# Altium footprint library NSC Amplifier.PcbLib: 106 footprints (part 5 of 7)
Each footprint in its own frame and in the unit in brackets; x right, y up, seen from the top. Pads: shape width x height; smd on the part's side, far side on the other; paste and mask are expansions set on the pad; w line width, h text height; cw(c..) or ccw(c..) is an arc to the next point about the centre after c.
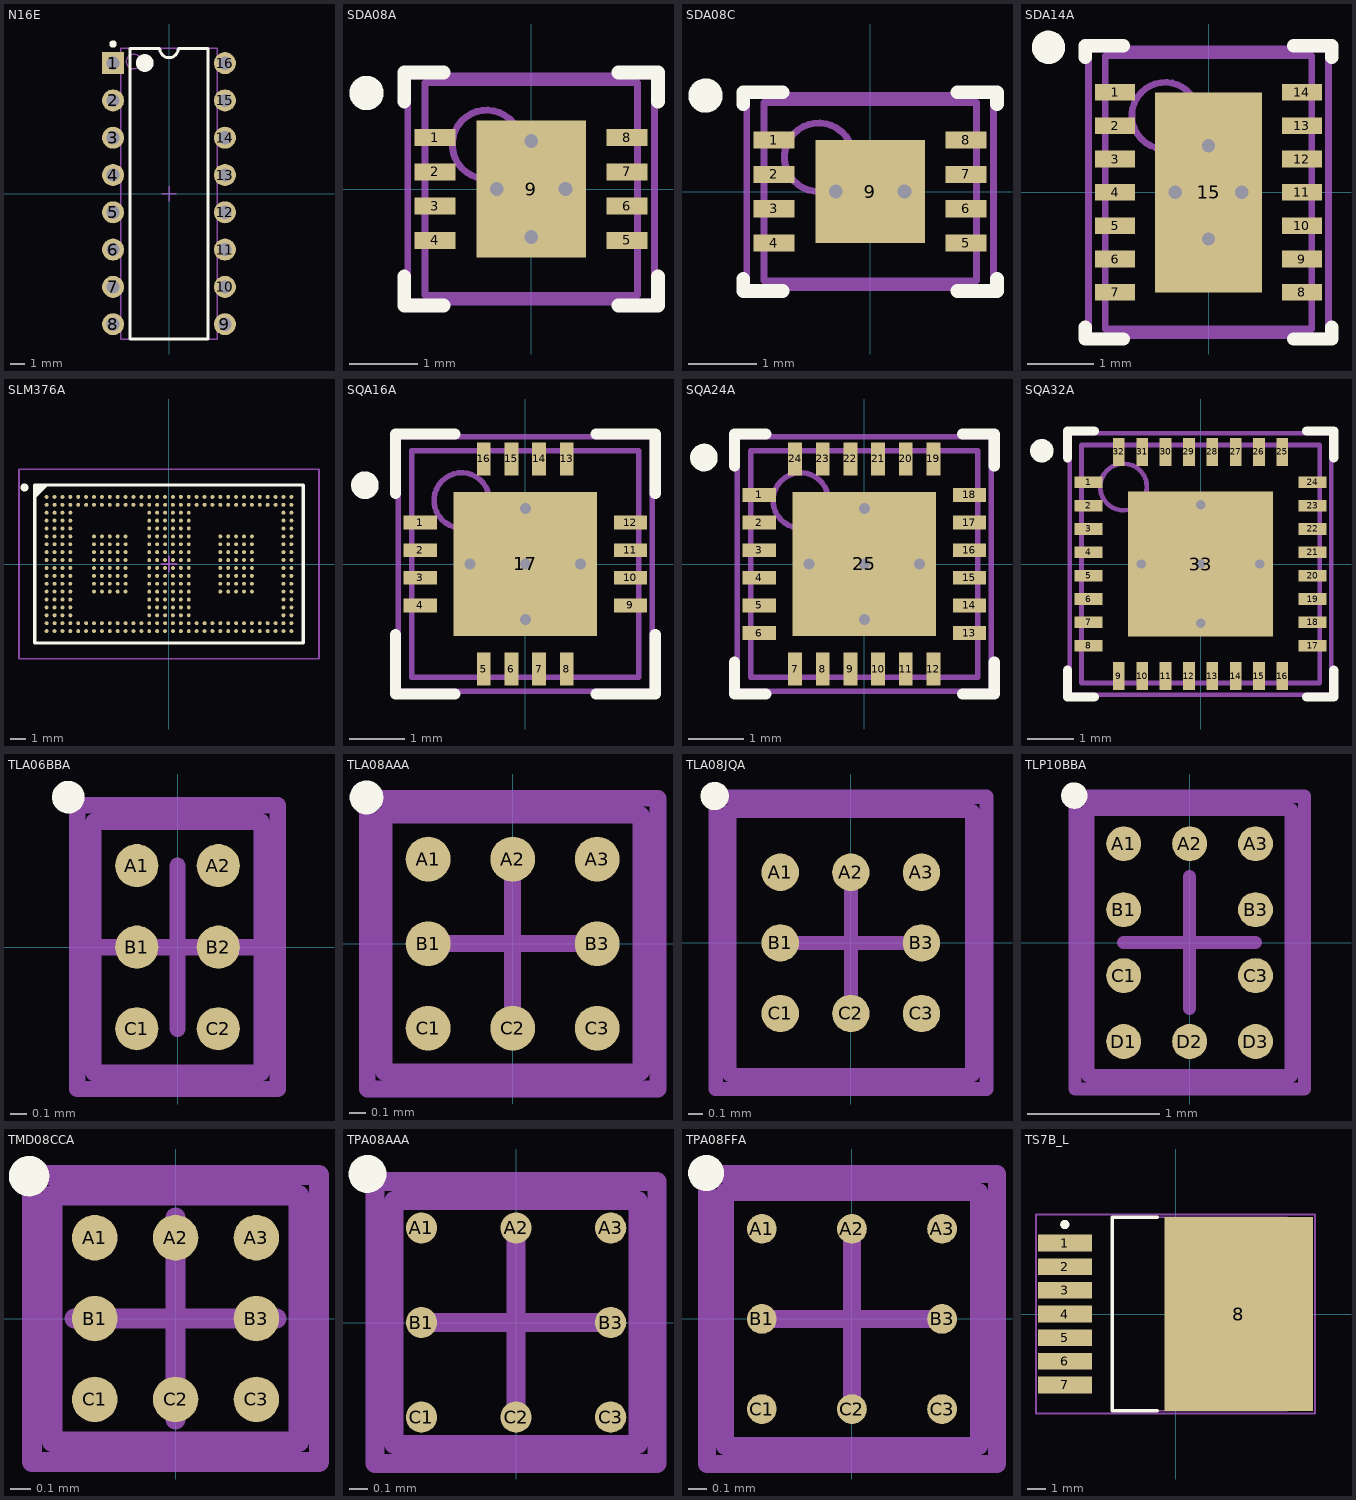
[diagram p4: the footprints below, top view; thin cyan lines are the x and y axes]

## N16E [mm] "DIP, 16-Leads, Row Spacing 7.62mm, Pitch 2.54mm, Body 19.3x6.35mm"
height 4.32
pads (16):
  rect 1.5x1.5 hole 0.9: 1(-3.81,8.89)
  round 1.5 hole 0.9: 2(-3.81,6.35) 3(-3.81,3.81) 4(-3.81,1.27) 5(-3.81,-1.27) 6(-3.81,-3.81) 7(-3.81,-6.35) 8(-3.81,-8.89) 9(3.81,-8.89) 10(3.81,-6.35) 11(3.81,-3.81) 12(3.81,-1.27) 13(3.81,1.27) 14(3.81,3.81) 15(3.81,6.35) 16(3.81,8.89)
Top Overlay:
  circle w0.25: c-3.81,10.19 r0.125
  circle w0.6: c-1.65,8.9 r0.3
  lines w0.2: -2.65,-9.9 -2.65,9.9 -0.635,9.9 ccw(c0,9.9) 0.635,9.9 2.65,9.9 2.65,-9.9 -2.65,-9.9
Mechanical 13:
  circle w0.1: c-2.4,9 r0.5
  lines w0.1: -3.3,-9.9 -3.3,9.9 3.3,9.9 3.3,-9.9 -3.3,-9.9
Mechanical 15:
  lines w0.1: -0.5,0 0.5,0 ; 0,-0.5 0,0.5
3D body: height 4.32, standoff 0, extent -3.3,-9.9 3.3,9.9

## SDA08A [mm] "SON, 8-Leads, Body 3x3mm, Pitch 0.5mm, NSC Recommended"
height 0.8
pads (9):
  rect 0.6x0.25 smd paste-0.125 mask+0.051: 1(-1.4,0.75) 2(-1.4,0.25) 3(-1.4,-0.25) 4(-1.4,-0.75) 5(1.4,-0.75) 6(1.4,-0.25) 7(1.4,0.25) 8(1.4,0.75)
  rect 1.6x2 smd paste-0.05 mask+0.051: 9(0,0)
via -0.5,0 diameter 0.5 hole 0.2
via 0.5,0 diameter 0.5 hole 0.2
via 0,0.7 diameter 0.5 hole 0.2
via 0,-0.7 diameter 0.5 hole 0.2
Top Overlay:
  circle w0.25: c-2.4,1.4 r0.125
  lines w0.2: -1.85,-1.275 -1.85,-1.7 -1.275,-1.7 ; -1.85,1.275 -1.85,1.7 -1.275,1.7 ; 1.275,-1.7 1.85,-1.7 1.85,-1.275 ; 1.275,1.7 1.85,1.7 1.85,1.275
Top Paste:
  region: 1.2,0.875 1.2,0.625 1.9,0.625 1.9,0.875
  region: 1.2,0.375 1.2,0.125 1.9,0.125 1.9,0.375
  region: 1.2,-0.125 1.2,-0.375 1.9,-0.375 1.9,-0.125
  region: 1.2,-0.625 1.2,-0.875 1.9,-0.875 1.9,-0.625
  region: -1.9,-0.625 -1.9,-0.875 -1.2,-0.875 -1.2,-0.625
  region: -1.9,-0.125 -1.9,-0.375 -1.2,-0.375 -1.2,-0.125
  region: -1.9,0.375 -1.9,0.125 -1.2,0.125 -1.2,0.375
  region: -1.9,0.875 -1.9,0.625 -1.2,0.625 -1.2,0.875
Mechanical 13:
  circle w0.1: c-0.65,0.65 r0.5
  lines w0.1: -1.55,-1.55 1.55,-1.55 1.55,1.55 -1.55,1.55 -1.55,-1.55
Mechanical 15:
  lines w0.1: -0.5,0 0.5,0 ; 0,-0.5 0,0.5 ; -1.8,-1.65 1.8,-1.65 1.8,1.65 -1.8,1.65 -1.8,-1.65
3D body: height 0.8, standoff 0, extent -1.55,-1.55 1.55,1.55

## SDA08C [mm] "SON, 8-Leads, Body 2.5x3mm, Pitch 0.5mm, NSC Recommended"
height 0.8
pads (9):
  rect 0.6x0.25 smd paste-0.125 mask+0.051: 1(-1.4,0.75) 2(-1.4,0.25) 3(-1.4,-0.25) 4(-1.4,-0.75) 5(1.4,-0.75) 6(1.4,-0.25) 7(1.4,0.25) 8(1.4,0.75)
  rect 1.6x1.5 smd paste-0.05 mask+0.051: 9(0,0)
via 0.5,0 diameter 0.5 hole 0.2
via -0.5,0 diameter 0.5 hole 0.2
Top Overlay:
  circle w0.25: c-2.4,1.4 r0.125
  lines w0.2: -1.85,-1.275 -1.85,-1.45 -1.275,-1.45 ; -1.85,1.275 -1.85,1.45 -1.275,1.45 ; 1.275,-1.45 1.85,-1.45 1.85,-1.275 ; 1.275,1.45 1.85,1.45 1.85,1.275
Top Paste:
  region: -1.9,0.875 -1.9,0.625 -1.2,0.625 -1.2,0.875
  region: -1.9,0.375 -1.9,0.125 -1.2,0.125 -1.2,0.375
  region: -1.9,-0.125 -1.9,-0.375 -1.2,-0.375 -1.2,-0.125
  region: -1.9,-0.625 -1.9,-0.875 -1.2,-0.875 -1.2,-0.625
  region: 1.2,-0.625 1.2,-0.875 1.9,-0.875 1.9,-0.625
  region: 1.2,-0.125 1.2,-0.375 1.9,-0.375 1.9,-0.125
  region: 1.2,0.375 1.2,0.125 1.9,0.125 1.9,0.375
  region: 1.2,0.875 1.2,0.625 1.9,0.625 1.9,0.875
Mechanical 13:
  circle w0.1: c-0.75,0.5 r0.5
  lines w0.1: -1.55,-1.3 -1.55,1.3 1.55,1.3 1.55,-1.3 -1.55,-1.3
Mechanical 15:
  lines w0.1: -0.5,0 0.5,0 ; 0,-0.5 0,0.5 ; -1.8,-1.4 1.8,-1.4 1.8,1.4 -1.8,1.4 -1.8,-1.4
3D body: height 0.8, standoff 0, extent -1.549,-1.299 1.549,1.299

## SDA14A [mm] "SON, 14-Leads, Body 4x3mm, Pitch 0.5mm, NSC Recommended"
height 0.8
pads (15):
  rect 0.6x0.25 smd paste-0.125 mask+0.051: 1(-1.4,1.5) 2(-1.4,1) 3(-1.4,0.5) 4(-1.4,0) 5(-1.4,-0.5) 6(-1.4,-1) 7(-1.4,-1.5) 8(1.4,-1.5) 9(1.4,-1) 10(1.4,-0.5) 11(1.4,0) 12(1.4,0.5) 13(1.4,1) 14(1.4,1.5)
  rect 1.6x3 smd paste-0.8 mask+0.051: 15(0,0)
via -0.5,0 diameter 0.5 hole 0.2
via 0.5,0 diameter 0.5 hole 0.2
via 0,0.7 diameter 0.5 hole 0.2
via 0,-0.7 diameter 0.5 hole 0.2
Top Overlay:
  circle w0.25: c-2.4,2.175 r0.125
  lines w0.2: -1.85,-2.025 -1.85,-2.2 -1.275,-2.2 ; -1.85,2.025 -1.85,2.2 -1.275,2.2 ; 1.275,-2.2 1.85,-2.2 1.85,-2.025 ; 1.275,2.2 1.85,2.2 1.85,2.025
Top Paste:
  region: -0.7,-0.1 -0.7,-1.4 -0.1,-1.4 -0.1,-0.1
  region: -0.1,0.1 -0.1,1.4 -0.7,1.4 -0.7,0.1
  region: 0.7,0.1 0.7,1.4 0.1,1.4 0.1,0.1
  region: 0.1,-0.1 0.1,-1.4 0.7,-1.4 0.7,-0.1
  region: 1.2,1.625 1.2,1.375 1.9,1.375 1.9,1.625
  region: 1.2,1.125 1.2,0.875 1.9,0.875 1.9,1.125
  region: 1.2,0.625 1.2,0.375 1.9,0.375 1.9,0.625
  region: 1.2,0.125 1.2,-0.125 1.9,-0.125 1.9,0.125
  region: 1.2,-0.375 1.2,-0.625 1.9,-0.625 1.9,-0.375
  region: 1.2,-0.875 1.2,-1.125 1.9,-1.125 1.9,-0.875
  region: 1.2,-1.375 1.2,-1.625 1.9,-1.625 1.9,-1.375
  region: -1.9,-1.375 -1.9,-1.625 -1.2,-1.625 -1.2,-1.375
  region: -1.9,-0.875 -1.9,-1.125 -1.2,-1.125 -1.2,-0.875
  region: -1.9,-0.375 -1.9,-0.625 -1.2,-0.625 -1.2,-0.375
  region: -1.9,0.125 -1.9,-0.125 -1.2,-0.125 -1.2,0.125
  region: -1.9,0.625 -1.9,0.375 -1.2,0.375 -1.2,0.625
  region: -1.9,1.125 -1.9,0.875 -1.2,0.875 -1.2,1.125
  region: -1.9,1.625 -1.9,1.375 -1.2,1.375 -1.2,1.625
Mechanical 13:
  circle w0.1: c-0.65,1.15 r0.5
  lines w0.1: -1.55,-2.05 1.55,-2.05 1.55,2.05 -1.55,2.05 -1.55,-2.05
Mechanical 15:
  lines w0.1: -0.5,0 0.5,0 ; 0,-0.5 0,0.5 ; -1.8,-2.15 1.8,-2.15 1.8,2.15 -1.8,2.15 -1.8,-2.15
3D body: height 0.8, standoff 0, extent -1.55,-2.05 1.55,2.05

## SLM376A [mm] "BGA, 376-Leads, Body 10x17mm, Pitch 0.5mm"
height 1.2
pads (376):
  round 0.25 smd: A1(-7.75,4.25) A2(-7.25,4.25) A3(-6.75,4.25) A4(-6.25,4.25) A5(-5.75,4.25) A6(-5.25,4.25) A7(-4.75,4.25) A8(-4.25,4.25) A9(-3.75,4.25) A10(-3.25,4.25) A11(-2.75,4.25) A12(-2.25,4.25) A13(-1.75,4.25) A14(-1.25,4.25) A15(-0.75,4.25) A16(-0.25,4.25) A17(0.25,4.25) A18(0.75,4.25) A19(1.25,4.25) A20(1.75,4.25) A21(2.25,4.25) A22(2.75,4.25) A23(3.25,4.25) A24(3.75,4.25) A25(4.25,4.25) A26(4.75,4.25) A27(5.25,4.25) A28(5.75,4.25) A29(6.25,4.25) A30(6.75,4.25) A31(7.25,4.25) A32(7.75,4.25) B1(-7.75,3.75) B2(-7.25,3.75) B3(-6.75,3.75) B4(-6.25,3.75) B5(-5.75,3.75) B6(-5.25,3.75) B7(-4.75,3.75) B8(-4.25,3.75) B9(-3.75,3.75) B10(-3.25,3.75) B11(-2.75,3.75) B12(-2.25,3.75) B13(-1.75,3.75) B14(-1.25,3.75) B15(-0.75,3.75) B16(-0.25,3.75) B17(0.25,3.75) B18(0.75,3.75) B19(1.25,3.75) B20(1.75,3.75) B21(2.25,3.75) B22(2.75,3.75) B23(3.25,3.75) B24(3.75,3.75) B25(4.25,3.75) B26(4.75,3.75) B27(5.25,3.75) B28(5.75,3.75) B29(6.25,3.75) B30(6.75,3.75) B31(7.25,3.75) B32(7.75,3.75) C1(-7.75,3.25) C2(-7.25,3.25) C3(-6.75,3.25) C4(-6.25,3.25) C14(-1.25,3.25) C15(-0.75,3.25) C16(-0.25,3.25) C17(0.25,3.25) C18(0.75,3.25) C19(1.25,3.25) C31(7.25,3.25) C32(7.75,3.25) D1(-7.75,2.75) D2(-7.25,2.75) D3(-6.75,2.75) D4(-6.25,2.75) D14(-1.25,2.75) D15(-0.75,2.75) D16(-0.25,2.75) D17(0.25,2.75) D18(0.75,2.75) D19(1.25,2.75) D31(7.25,2.75) D32(7.75,2.75) E1(-7.75,2.25) E2(-7.25,2.25) E3(-6.75,2.25) E4(-6.25,2.25) E14(-1.25,2.25) E15(-0.75,2.25) E16(-0.25,2.25) E17(0.25,2.25) E18(0.75,2.25) E19(1.25,2.25) E31(7.25,2.25) E32(7.75,2.25) F1(-7.75,1.75) F2(-7.25,1.75) F3(-6.75,1.75) F4(-6.25,1.75) F7(-4.75,1.75) F8(-4.25,1.75) F9(-3.75,1.75) F10(-3.25,1.75) F11(-2.75,1.75) F14(-1.25,1.75) F15(-0.75,1.75) F16(-0.25,1.75) F17(0.25,1.75) F18(0.75,1.75) F19(1.25,1.75) F23(3.25,1.75) F24(3.75,1.75) F25(4.25,1.75) F26(4.75,1.75) F27(5.25,1.75) F31(7.25,1.75) F32(7.75,1.75) G1(-7.75,1.25) G2(-7.25,1.25) G3(-6.75,1.25) G4(-6.25,1.25) G7(-4.75,1.25) G8(-4.25,1.25) G9(-3.75,1.25) G10(-3.25,1.25) G11(-2.75,1.25) G14(-1.25,1.25) G15(-0.75,1.25) G16(-0.25,1.25) G17(0.25,1.25) G18(0.75,1.25) G19(1.25,1.25) G23(3.25,1.25) G24(3.75,1.25) G25(4.25,1.25) G26(4.75,1.25) G27(5.25,1.25) G31(7.25,1.25) G32(7.75,1.25) H1(-7.75,0.75) H2(-7.25,0.75) H3(-6.75,0.75) H4(-6.25,0.75) H7(-4.75,0.75) H8(-4.25,0.75) H9(-3.75,0.75) H10(-3.25,0.75) H11(-2.75,0.75) H14(-1.25,0.75) H15(-0.75,0.75) H16(-0.25,0.75) H17(0.25,0.75) H18(0.75,0.75) H19(1.25,0.75) H23(3.25,0.75) H24(3.75,0.75) H25(4.25,0.75) H26(4.75,0.75) H27(5.25,0.75) H31(7.25,0.75) H32(7.75,0.75) J1(-7.75,0.25) J2(-7.25,0.25) J3(-6.75,0.25) J4(-6.25,0.25) J7(-4.75,0.25) J8(-4.25,0.25) J9(-3.75,0.25) J10(-3.25,0.25) J11(-2.75,0.25) J14(-1.25,0.25) J15(-0.75,0.25) J16(-0.25,0.25) J17(0.25,0.25) J18(0.75,0.25) J19(1.25,0.25) J23(3.25,0.25) J24(3.75,0.25) J25(4.25,0.25) J26(4.75,0.25) J27(5.25,0.25) J31(7.25,0.25) J32(7.75,0.25) K1(-7.75,-0.25) K2(-7.25,-0.25) K3(-6.75,-0.25) K4(-6.25,-0.25) K7(-4.75,-0.25) K8(-4.25,-0.25) K9(-3.75,-0.25) K10(-3.25,-0.25) K11(-2.75,-0.25) K14(-1.25,-0.25) K15(-0.75,-0.25) K16(-0.25,-0.25) K17(0.25,-0.25) K18(0.75,-0.25) K19(1.25,-0.25) K23(3.25,-0.25) K24(3.75,-0.25) K25(4.25,-0.25) K26(4.75,-0.25) K27(5.25,-0.25) K31(7.25,-0.25) K32(7.75,-0.25) L1(-7.75,-0.75) L2(-7.25,-0.75) L3(-6.75,-0.75) L4(-6.25,-0.75) L7(-4.75,-0.75) L8(-4.25,-0.75) L9(-3.75,-0.75) L10(-3.25,-0.75) L11(-2.75,-0.75) L14(-1.25,-0.75) L15(-0.75,-0.75) L16(-0.25,-0.75) L17(0.25,-0.75) L18(0.75,-0.75) L19(1.25,-0.75) L23(3.25,-0.75) L24(3.75,-0.75) L25(4.25,-0.75) L26(4.75,-0.75) L27(5.25,-0.75) L31(7.25,-0.75) L32(7.75,-0.75) M1(-7.75,-1.25) M2(-7.25,-1.25) M3(-6.75,-1.25) M4(-6.25,-1.25) M7(-4.75,-1.25) M8(-4.25,-1.25) M9(-3.75,-1.25) M10(-3.25,-1.25) M11(-2.75,-1.25) M14(-1.25,-1.25) M15(-0.75,-1.25) M16(-0.25,-1.25) M17(0.25,-1.25) M18(0.75,-1.25) M19(1.25,-1.25) M23(3.25,-1.25) M24(3.75,-1.25) M25(4.25,-1.25) M26(4.75,-1.25) M27(5.25,-1.25) M31(7.25,-1.25) M32(7.75,-1.25) N1(-7.75,-1.75) N2(-7.25,-1.75) N3(-6.75,-1.75) N4(-6.25,-1.75) N7(-4.75,-1.75) N8(-4.25,-1.75) N9(-3.75,-1.75) N10(-3.25,-1.75) N11(-2.75,-1.75) N14(-1.25,-1.75) N15(-0.75,-1.75) N16(-0.25,-1.75) N17(0.25,-1.75) N18(0.75,-1.75) N19(1.25,-1.75) N23(3.25,-1.75) N24(3.75,-1.75) N25(4.25,-1.75) N26(4.75,-1.75) N27(5.25,-1.75) N31(7.25,-1.75) N32(7.75,-1.75) P1(-7.75,-2.25) P2(-7.25,-2.25) P3(-6.75,-2.25) P4(-6.25,-2.25) P14(-1.25,-2.25) P15(-0.75,-2.25) P16(-0.25,-2.25) P17(0.25,-2.25) P18(0.75,-2.25) P19(1.25,-2.25) P31(7.25,-2.25) P32(7.75,-2.25) R1(-7.75,-2.75) R2(-7.25,-2.75) R3(-6.75,-2.75) R4(-6.25,-2.75) R14(-1.25,-2.75) R15(-0.75,-2.75) R16(-0.25,-2.75) R17(0.25,-2.75) R18(0.75,-2.75) R19(1.25,-2.75) R31(7.25,-2.75) R32(7.75,-2.75) T1(-7.75,-3.25) T2(-7.25,-3.25) T3(-6.75,-3.25) T4(-6.25,-3.25) T14(-1.25,-3.25) T15(-0.75,-3.25) T16(-0.25,-3.25) T17(0.25,-3.25) T18(0.75,-3.25) T19(1.25,-3.25) T31(7.25,-3.25) T32(7.75,-3.25) U1(-7.75,-3.75) U2(-7.25,-3.75) U3(-6.75,-3.75) U4(-6.25,-3.75) U5(-5.75,-3.75) U6(-5.25,-3.75) U7(-4.75,-3.75) U8(-4.25,-3.75) U9(-3.75,-3.75) U10(-3.25,-3.75) U11(-2.75,-3.75) U12(-2.25,-3.75) U13(-1.75,-3.75) U14(-1.25,-3.75) U15(-0.75,-3.75) U16(-0.25,-3.75) U17(0.25,-3.75) U18(0.75,-3.75) U19(1.25,-3.75) U20(1.75,-3.75) U21(2.25,-3.75) U22(2.75,-3.75) U23(3.25,-3.75) U24(3.75,-3.75) U25(4.25,-3.75) U26(4.75,-3.75) U27(5.25,-3.75) U28(5.75,-3.75) U29(6.25,-3.75) U30(6.75,-3.75) U31(7.25,-3.75) U32(7.75,-3.75) V1(-7.75,-4.25) V2(-7.25,-4.25) V3(-6.75,-4.25) V4(-6.25,-4.25) V5(-5.75,-4.25) V6(-5.25,-4.25) V7(-4.75,-4.25) V8(-4.25,-4.25) V9(-3.75,-4.25) V10(-3.25,-4.25) V11(-2.75,-4.25) V12(-2.25,-4.25) V13(-1.75,-4.25) V14(-1.25,-4.25) V15(-0.75,-4.25) V16(-0.25,-4.25) V17(0.25,-4.25) V18(0.75,-4.25) V19(1.25,-4.25) V20(1.75,-4.25) V21(2.25,-4.25) V22(2.75,-4.25) V23(3.25,-4.25) V24(3.75,-4.25) V25(4.25,-4.25) V26(4.75,-4.25) V27(5.25,-4.25) V28(5.75,-4.25) V29(6.25,-4.25) V30(6.75,-4.25) V31(7.25,-4.25) V32(7.75,-4.25)
Top Overlay:
  circle w0.25: c-9.15,4.85 r0.125
  region: -7.742,5 -8.5,4.242 -8.5,5
  lines w0.2: -8.5,4.242 -7.742,5 ; -8.5,-5 8.5,-5 8.5,5 -8.5,5 -8.5,-5
Mechanical 13:
  lines w0.1: -8.5,-5 8.5,-5 8.5,5 -8.5,5 -8.5,-5
Mechanical 15:
  lines w0.1: -0.5,0 0.5,0 ; 0,-0.5 0,0.5 ; -9.5,-6 9.5,-6 9.5,6 -9.5,6 -9.5,-6
3D body: height 1.2, standoff 0.16, extent -8.5,-5 8.5,5

## SQA16A [mm] "QFN, 16-Leads, Body 4x4mm, Pitch 0.5mm, NSC Recommended"
height 0.8
pads (17):
  rect 0.6x0.25 smd paste-0.125 mask+0.051: 1(-1.9,0.75) 2(-1.9,0.25) 3(-1.9,-0.25) 4(-1.9,-0.75) 9(1.9,-0.75) 10(1.9,-0.25) 11(1.9,0.25) 12(1.9,0.75)
  rect 0.25x0.6 smd paste-0.125 mask+0.051: 5(-0.75,-1.9) 6(-0.25,-1.9) 7(0.25,-1.9) 8(0.75,-1.9) 13(0.75,1.9) 14(0.25,1.9) 15(-0.25,1.9) 16(-0.75,1.9)
  rect 2.6x2.6 smd paste-1.3 mask+0.051: 17(0,0)
via 0,-1 diameter 0.5 hole 0.2
via 0,1 diameter 0.5 hole 0.2
via -1,0 diameter 0.5 hole 0.2
via 1,0 diameter 0.5 hole 0.2
via 0,0 diameter 0.5 hole 0.2
Top Overlay:
  circle w0.25: c-2.9,1.425 r0.125
  lines w0.2: -2.35,-1.275 -2.35,-2.35 -1.275,-2.35 ; -2.35,1.275 -2.35,2.35 -1.275,2.35 ; 1.275,-2.35 2.35,-2.35 2.35,-1.275 ; 1.275,2.35 2.35,2.35 2.35,1.275
Top Paste:
  rectangle: 0.1,-1.2 1.2,-0.1
  region: -0.1,-0.1 -1.2,-0.1 -1.2,-1.2 -0.1,-1.2
  region: -0.1,1.2 -1.2,1.2 -1.2,0.1 -0.1,0.1
  rectangle: 0.1,0.1 1.2,1.2
  rectangle: -2.4,0.625 -1.7,0.875
  rectangle: -2.4,0.125 -1.7,0.375
  rectangle: -2.4,-0.375 -1.7,-0.125
  rectangle: -2.4,-0.875 -1.7,-0.625
  region: 2.4,0.875 1.7,0.875 1.7,0.625 2.4,0.625
  region: 2.4,0.375 1.7,0.375 1.7,0.125 2.4,0.125
  region: 2.4,-0.125 1.7,-0.125 1.7,-0.375 2.4,-0.375
  region: 2.4,-0.625 1.7,-0.625 1.7,-0.875 2.4,-0.875
  region: -0.875,2.4 -0.875,1.7 -0.625,1.7 -0.625,2.4
  region: -0.375,2.4 -0.375,1.7 -0.125,1.7 -0.125,2.4
  region: 0.125,2.4 0.125,1.7 0.375,1.7 0.375,2.4
  region: 0.625,2.4 0.625,1.7 0.875,1.7 0.875,2.4
  region: 0.875,-2.4 0.875,-1.7 0.625,-1.7 0.625,-2.4
  region: 0.375,-2.4 0.375,-1.7 0.125,-1.7 0.125,-2.4
  region: -0.125,-2.4 -0.125,-1.7 -0.375,-1.7 -0.375,-2.4
  region: -0.625,-2.4 -0.625,-1.7 -0.875,-1.7 -0.875,-2.4
Mechanical 13:
  circle w0.1: c-1.15,1.15 r0.5
  lines w0.1: -2.05,-2.05 -2.05,2.05 2.05,2.05 2.05,-2.05 -2.05,-2.05
Mechanical 15:
  lines w0.1: -0.5,0 0.5,0 ; 0,-0.5 0,0.5 ; -2.3,-2.3 -2.3,2.3 2.3,2.3 2.3,-2.3 -2.3,-2.3
3D body: height 0.8, standoff 0, extent -2.05,-2.05 2.05,2.05

## SQA24A [mm] "QFN, 24-Leads, Body 4x4mm, Pitch 0.5mm, NSC Recommended"
height 0.8
pads (25):
  rect 0.6x0.25 smd paste-0.125 mask+0.051: 1(-1.9,1.25) 2(-1.9,0.75) 3(-1.9,0.25) 4(-1.9,-0.25) 5(-1.9,-0.75) 6(-1.9,-1.25) 13(1.9,-1.25) 14(1.9,-0.75) 15(1.9,-0.25) 16(1.9,0.25) 17(1.9,0.75) 18(1.9,1.25)
  rect 0.25x0.6 smd paste-0.125 mask+0.051: 7(-1.25,-1.9) 8(-0.75,-1.9) 9(-0.25,-1.9) 10(0.25,-1.9) 11(0.75,-1.9) 12(1.25,-1.9) 19(1.25,1.9) 20(0.75,1.9) 21(0.25,1.9) 22(-0.25,1.9) 23(-0.75,1.9) 24(-1.25,1.9)
  rect 2.6x2.6 smd paste-1.3 mask+0.051: 25(0,0)
via 0,-1 diameter 0.5 hole 0.2
via 0,1 diameter 0.5 hole 0.2
via -1,0 diameter 0.5 hole 0.2
via 1,0 diameter 0.5 hole 0.2
via 0,0 diameter 0.5 hole 0.2
Top Overlay:
  circle w0.25: c-2.9,1.925 r0.125
  lines w0.2: -2.35,-1.775 -2.35,-2.35 -1.775,-2.35 ; -2.35,1.775 -2.35,2.35 -1.775,2.35 ; 1.775,-2.35 2.35,-2.35 2.35,-1.775 ; 1.775,2.35 2.35,2.35 2.35,1.775
Top Paste:
  rectangle: 0.1,0.1 1.2,1.2
  region: -0.1,1.2 -1.2,1.2 -1.2,0.1 -0.1,0.1
  region: -0.1,-0.1 -1.2,-0.1 -1.2,-1.2 -0.1,-1.2
  rectangle: 0.1,-1.2 1.2,-0.1
  rectangle: -2.4,1.125 -1.7,1.375
  rectangle: -2.4,0.625 -1.7,0.875
  rectangle: -2.4,0.125 -1.7,0.375
  rectangle: -2.4,-0.375 -1.7,-0.125
  rectangle: -2.4,-0.875 -1.7,-0.625
  rectangle: -2.4,-1.375 -1.7,-1.125
  region: 1.375,-2.4 1.375,-1.7 1.125,-1.7 1.125,-2.4
  region: 0.875,-2.4 0.875,-1.7 0.625,-1.7 0.625,-2.4
  region: 0.375,-2.4 0.375,-1.7 0.125,-1.7 0.125,-2.4
  region: -0.125,-2.4 -0.125,-1.7 -0.375,-1.7 -0.375,-2.4
  region: -0.625,-2.4 -0.625,-1.7 -0.875,-1.7 -0.875,-2.4
  region: -1.125,-2.4 -1.125,-1.7 -1.375,-1.7 -1.375,-2.4
  region: 2.4,1.375 1.7,1.375 1.7,1.125 2.4,1.125
  region: 2.4,0.875 1.7,0.875 1.7,0.625 2.4,0.625
  region: 2.4,0.375 1.7,0.375 1.7,0.125 2.4,0.125
  region: 2.4,-0.125 1.7,-0.125 1.7,-0.375 2.4,-0.375
  region: 2.4,-0.625 1.7,-0.625 1.7,-0.875 2.4,-0.875
  region: 2.4,-1.125 1.7,-1.125 1.7,-1.375 2.4,-1.375
  region: -1.375,2.4 -1.375,1.7 -1.125,1.7 -1.125,2.4
  region: -0.875,2.4 -0.875,1.7 -0.625,1.7 -0.625,2.4
  region: -0.375,2.4 -0.375,1.7 -0.125,1.7 -0.125,2.4
  region: 0.125,2.4 0.125,1.7 0.375,1.7 0.375,2.4
  region: 0.625,2.4 0.625,1.7 0.875,1.7 0.875,2.4
  region: 1.125,2.4 1.125,1.7 1.375,1.7 1.375,2.4
Mechanical 13:
  circle w0.1: c-1.15,1.15 r0.5
  lines w0.1: -2.05,-2.05 2.05,-2.05 2.05,2.05 -2.05,2.05 -2.05,-2.05
Mechanical 15:
  lines w0.1: -0.5,0 0.5,0 ; 0,-0.5 0,0.5 ; -2.3,-2.3 2.3,-2.3 2.3,2.3 -2.3,2.3 -2.3,-2.3
3D body: height 0.8, standoff 0, extent -2.05,-2.05 2.05,2.05

## SQA32A [mm] "QFN, 32-Leads, Body 5x5mm, Pitch 0.5mm, NSC Recommended"
height 0.8
pads (33):
  rect 0.6x0.25 smd paste-0.125 mask+0.051: 1(-2.4,1.75) 2(-2.4,1.25) 3(-2.4,0.75) 4(-2.4,0.25) 5(-2.4,-0.25) 6(-2.4,-0.75) 7(-2.4,-1.25) 8(-2.4,-1.75) 17(2.4,-1.75) 18(2.4,-1.25) 19(2.4,-0.75) 20(2.4,-0.25) 21(2.4,0.25) 22(2.4,0.75) 23(2.4,1.25) 24(2.4,1.75)
  rect 0.25x0.6 smd paste-0.125 mask+0.051: 9(-1.75,-2.4) 10(-1.25,-2.4) 11(-0.75,-2.4) 12(-0.25,-2.4) 13(0.25,-2.4) 14(0.75,-2.4) 15(1.25,-2.4) 16(1.75,-2.4) 25(1.75,2.4) 26(1.25,2.4) 27(0.75,2.4) 28(0.25,2.4) 29(-0.25,2.4) 30(-0.75,2.4) 31(-1.25,2.4) 32(-1.75,2.4)
  rect 3.1x3.1 smd paste-1.55 mask+0.051: 33(0,0)
via 0,-1.27 diameter 0.5 hole 0.2
via 1.27,0 diameter 0.5 hole 0.2
via 0,0 diameter 0.5 hole 0.2
via -1.27,0 diameter 0.5 hole 0.2
via 0,1.27 diameter 0.5 hole 0.2
Top Overlay:
  circle w0.25: c-3.4,2.425 r0.125
  lines w0.2: -2.85,-2.275 -2.85,-2.85 -2.275,-2.85 ; -2.85,2.275 -2.85,2.85 -2.275,2.85 ; 2.275,-2.85 2.85,-2.85 2.85,-2.275 ; 2.275,2.85 2.85,2.85 2.85,2.275
Top Paste:
  rectangle: 0.1,-1.4 1.4,-0.1
  region: -0.1,-0.1 -1.4,-0.1 -1.4,-1.4 -0.1,-1.4
  region: -0.1,1.4 -1.4,1.4 -1.4,0.1 -0.1,0.1
  rectangle: 0.1,0.1 1.4,1.4
  rectangle: -2.9,1.625 -2.2,1.875
  rectangle: -2.9,1.125 -2.2,1.375
  rectangle: -2.9,0.625 -2.2,0.875
  rectangle: -2.9,0.125 -2.2,0.375
  rectangle: -2.9,-0.375 -2.2,-0.125
  rectangle: -2.9,-0.875 -2.2,-0.625
  rectangle: -2.9,-1.375 -2.2,-1.125
  rectangle: -2.9,-1.875 -2.2,-1.625
  region: 1.875,-2.9 1.875,-2.2 1.625,-2.2 1.625,-2.9
  region: 1.375,-2.9 1.375,-2.2 1.125,-2.2 1.125,-2.9
  region: 0.875,-2.9 0.875,-2.2 0.625,-2.2 0.625,-2.9
  region: 0.375,-2.9 0.375,-2.2 0.125,-2.2 0.125,-2.9
  region: -0.125,-2.9 -0.125,-2.2 -0.375,-2.2 -0.375,-2.9
  region: -0.625,-2.9 -0.625,-2.2 -0.875,-2.2 -0.875,-2.9
  region: -1.125,-2.9 -1.125,-2.2 -1.375,-2.2 -1.375,-2.9
  region: -1.625,-2.9 -1.625,-2.2 -1.875,-2.2 -1.875,-2.9
  region: 2.9,1.875 2.2,1.875 2.2,1.625 2.9,1.625
  region: 2.9,1.375 2.2,1.375 2.2,1.125 2.9,1.125
  region: 2.9,0.875 2.2,0.875 2.2,0.625 2.9,0.625
  region: 2.9,0.375 2.2,0.375 2.2,0.125 2.9,0.125
  region: 2.9,-0.125 2.2,-0.125 2.2,-0.375 2.9,-0.375
  region: 2.9,-0.625 2.2,-0.625 2.2,-0.875 2.9,-0.875
  region: 2.9,-1.125 2.2,-1.125 2.2,-1.375 2.9,-1.375
  region: 2.9,-1.625 2.2,-1.625 2.2,-1.875 2.9,-1.875
  region: -1.875,2.9 -1.875,2.2 -1.625,2.2 -1.625,2.9
  region: -1.375,2.9 -1.375,2.2 -1.125,2.2 -1.125,2.9
  region: -0.875,2.9 -0.875,2.2 -0.625,2.2 -0.625,2.9
  region: -0.375,2.9 -0.375,2.2 -0.125,2.2 -0.125,2.9
  region: 0.125,2.9 0.125,2.2 0.375,2.2 0.375,2.9
  region: 0.625,2.9 0.625,2.2 0.875,2.2 0.875,2.9
  region: 1.125,2.9 1.125,2.2 1.375,2.2 1.375,2.9
  region: 1.625,2.9 1.625,2.2 1.875,2.2 1.875,2.9
Mechanical 13:
  circle w0.1: c-1.65,1.65 r0.5
  lines w0.1: -2.55,-2.55 2.55,-2.55 2.55,2.55 -2.55,2.55 -2.55,-2.55
Mechanical 15:
  lines w0.1: -0.5,0 0.5,0 ; 0,-0.5 0,0.5 ; -2.8,-2.8 2.8,-2.8 2.8,2.8 -2.8,2.8 -2.8,-2.8
3D body: height 0.8, standoff 0, extent -2.55,-2.55 2.55,2.55

## TLA06BBA [mm] "Micro SMD, 6-Leads, Body 1.54x1.03mm, Pitch 0.5mm, NSC Recommended"
height 0.68
pads (6):
  round 0.265 smd paste-0.132 mask+0.05: A1(-0.25,0.5) A2(0.25,0.5) B1(-0.25,0) B2(0.25,0) C1(-0.25,-0.5) C2(0.25,-0.5)
Top Overlay:
  circle w0.1: c-0.67,0.92 r0.05
Top Paste:
  circle w0.05: c0.35,0.075 r0.025
  circle w0.05: c0.2,-0.075 r0.025
  circle w0.05: c0.35,-0.075 r0.025
  circle w0.05: c0.2,0.075 r0.025
  circle w0.05: c-0.35,-0.075 r0.025
  circle w0.05: c-0.2,0.075 r0.025
  circle w0.05: c-0.35,0.075 r0.025
  circle w0.05: c-0.2,-0.075 r0.025
  circle w0.05: c-0.2,0.45 r0.025
  circle w0.05: c-0.35,0.6 r0.025
  circle w0.05: c-0.2,0.6 r0.025
  circle w0.05: c-0.35,0.45 r0.025
  circle w0.05: c-0.2,-0.45 r0.025
  circle w0.05: c-0.35,-0.6 r0.025
  circle w0.05: c-0.35,-0.45 r0.025
  circle w0.05: c-0.2,-0.6 r0.025
  circle w0.05: c0.2,-0.45 r0.025
  circle w0.05: c0.35,-0.6 r0.025
  circle w0.05: c0.2,-0.6 r0.025
  circle w0.05: c0.35,-0.45 r0.025
  circle w0.05: c0.2,0.45 r0.025
  circle w0.05: c0.35,0.6 r0.025
  circle w0.05: c0.35,0.45 r0.025
  circle w0.05: c0.2,0.6 r0.025
  region: 0.2,-0.075 0.2,0.075 0.15,0.075 0.15,-0.075
  region: 0.35,-0.075 0.2,-0.075 0.2,-0.125 0.35,-0.125
  region: 0.35,0.075 0.35,-0.075 0.4,-0.075 0.4,0.075
  rectangle: 0.2,0.075 0.35,0.125
  region: 0.35,0.075 0.2,0.075 0.2,-0.075 0.35,-0.075
  region: -0.2,0.075 -0.2,-0.075 -0.15,-0.075 -0.15,0.075
  rectangle: -0.35,0.075 -0.2,0.125
  region: -0.35,-0.075 -0.35,0.075 -0.4,0.075 -0.4,-0.075
  region: -0.2,-0.075 -0.35,-0.075 -0.35,-0.125 -0.2,-0.125
  rectangle: -0.35,-0.075 -0.2,0.075
  rectangle: -0.35,0.45 -0.2,0.6
  region: -0.2,0.45 -0.35,0.45 -0.35,0.4 -0.2,0.4
  region: -0.35,0.45 -0.35,0.6 -0.4,0.6 -0.4,0.45
  rectangle: -0.35,0.6 -0.2,0.65
  region: -0.2,0.6 -0.2,0.45 -0.15,0.45 -0.15,0.6
  region: -0.2,-0.6 -0.2,-0.45 -0.35,-0.45 -0.35,-0.6
  region: -0.2,-0.45 -0.2,-0.6 -0.15,-0.6 -0.15,-0.45
  region: -0.2,-0.6 -0.35,-0.6 -0.35,-0.65 -0.2,-0.65
  region: -0.35,-0.6 -0.35,-0.45 -0.4,-0.45 -0.4,-0.6
  rectangle: -0.35,-0.45 -0.2,-0.4
  region: 0.35,-0.45 0.2,-0.45 0.2,-0.6 0.35,-0.6
  rectangle: 0.2,-0.45 0.35,-0.4
  region: 0.35,-0.45 0.35,-0.6 0.4,-0.6 0.4,-0.45
  region: 0.35,-0.6 0.2,-0.6 0.2,-0.65 0.35,-0.65
  region: 0.2,-0.6 0.2,-0.45 0.15,-0.45 0.15,-0.6
  region: 0.2,0.6 0.2,0.45 0.35,0.45 0.35,0.6
  region: 0.2,0.45 0.2,0.6 0.15,0.6 0.15,0.45
  rectangle: 0.2,0.6 0.35,0.65
  region: 0.35,0.6 0.35,0.45 0.4,0.45 0.4,0.6
  region: 0.35,0.45 0.2,0.45 0.2,0.4 0.35,0.4
Mechanical 13:
  lines w0.1: -0.515,-0.77 -0.515,0.77 0.515,0.77 0.515,-0.77 -0.515,-0.77
Mechanical 15:
  lines w0.1: -0.5,0 0.5,0 ; 0,-0.5 0,0.5 ; -0.615,-0.87 -0.615,0.87 0.615,0.87 0.615,-0.87 -0.615,-0.87
3D body: height 0.68, standoff 0, extent -0.514,-0.769 0.514,0.769

## TLA08AAA [mm] "Micro SMD, 8-Leads, Body 1.52x1.52mm, Pitch 0.5mm, NSC Recommended"
height 0.68
pads (8):
  round 0.265 smd paste-0.132 mask+0.05: A1(-0.5,0.5) A2(0,0.5) A3(0.5,0.5) B1(-0.5,0) B3(0.5,0) C1(-0.5,-0.5) C2(0,-0.5) C3(0.5,-0.5)
Top Overlay:
  circle w0.1: c-0.865,0.865 r0.05
Top Paste:
  circle w0.05: c-0.075,-0.6 r0.025
  circle w0.05: c0.075,-0.45 r0.025
  circle w0.05: c-0.075,-0.45 r0.025
  circle w0.05: c0.075,-0.6 r0.025
  circle w0.05: c0.45,-0.075 r0.025
  circle w0.05: c0.6,0.075 r0.025
  circle w0.05: c0.45,0.075 r0.025
  circle w0.05: c0.6,-0.075 r0.025
  circle w0.05: c-0.6,-0.075 r0.025
  circle w0.05: c-0.45,0.075 r0.025
  circle w0.05: c-0.6,0.075 r0.025
  circle w0.05: c-0.45,-0.075 r0.025
  circle w0.05: c-0.075,0.45 r0.025
  circle w0.05: c0.075,0.6 r0.025
  circle w0.05: c-0.075,0.6 r0.025
  circle w0.05: c0.075,0.45 r0.025
  circle w0.05: c-0.6,0.45 r0.025
  circle w0.05: c-0.45,0.6 r0.025
  circle w0.05: c-0.6,0.6 r0.025
  circle w0.05: c-0.45,0.45 r0.025
  circle w0.05: c0.45,0.45 r0.025
  circle w0.05: c0.6,0.6 r0.025
  circle w0.05: c0.45,0.6 r0.025
  circle w0.05: c0.6,0.45 r0.025
  circle w0.05: c-0.6,-0.6 r0.025
  circle w0.05: c-0.45,-0.45 r0.025
  circle w0.05: c-0.6,-0.45 r0.025
  circle w0.05: c-0.45,-0.6 r0.025
  circle w0.05: c0.45,-0.6 r0.025
  circle w0.05: c0.6,-0.45 r0.025
  circle w0.05: c0.45,-0.45 r0.025
  circle w0.05: c0.6,-0.6 r0.025
  region: 0.075,-0.45 0.075,-0.6 0.125,-0.6 0.125,-0.45
  rectangle: -0.075,-0.45 0.075,-0.4
  region: -0.075,-0.6 -0.075,-0.45 -0.125,-0.45 -0.125,-0.6
  region: 0.075,-0.6 -0.075,-0.6 -0.075,-0.65 0.075,-0.65
  rectangle: -0.075,-0.6 0.075,-0.45
  region: 0.6,0.075 0.6,-0.075 0.65,-0.075 0.65,0.075
  rectangle: 0.45,0.075 0.6,0.125
  region: 0.45,-0.075 0.45,0.075 0.4,0.075 0.4,-0.075
  region: 0.6,-0.075 0.45,-0.075 0.45,-0.125 0.6,-0.125
  rectangle: 0.45,-0.075 0.6,0.075
  region: -0.45,0.075 -0.45,-0.075 -0.4,-0.075 -0.4,0.075
  rectangle: -0.6,0.075 -0.45,0.125
  region: -0.6,-0.075 -0.6,0.075 -0.65,0.075 -0.65,-0.075
  region: -0.45,-0.075 -0.6,-0.075 -0.6,-0.125 -0.45,-0.125
  rectangle: -0.6,-0.075 -0.45,0.075
  region: 0.075,0.6 0.075,0.45 0.125,0.45 0.125,0.6
  rectangle: -0.075,0.6 0.075,0.65
  region: -0.075,0.45 -0.075,0.6 -0.125,0.6 -0.125,0.45
  region: 0.075,0.45 -0.075,0.45 -0.075,0.4 0.075,0.4
  rectangle: -0.075,0.45 0.075,0.6
  region: -0.45,0.6 -0.45,0.45 -0.4,0.45 -0.4,0.6
  rectangle: -0.6,0.6 -0.45,0.65
  region: -0.6,0.45 -0.6,0.6 -0.65,0.6 -0.65,0.45
  region: -0.45,0.45 -0.6,0.45 -0.6,0.4 -0.45,0.4
  rectangle: -0.6,0.45 -0.45,0.6
  region: 0.6,0.6 0.6,0.45 0.65,0.45 0.65,0.6
  rectangle: 0.45,0.6 0.6,0.65
  region: 0.45,0.45 0.45,0.6 0.4,0.6 0.4,0.45
  region: 0.6,0.45 0.45,0.45 0.45,0.4 0.6,0.4
  rectangle: 0.45,0.45 0.6,0.6
  region: -0.45,-0.45 -0.45,-0.6 -0.4,-0.6 -0.4,-0.45
  rectangle: -0.6,-0.45 -0.45,-0.4
  region: -0.6,-0.6 -0.6,-0.45 -0.65,-0.45 -0.65,-0.6
  region: -0.45,-0.6 -0.6,-0.6 -0.6,-0.65 -0.45,-0.65
  rectangle: -0.6,-0.6 -0.45,-0.45
  region: 0.6,-0.45 0.6,-0.6 0.65,-0.6 0.65,-0.45
  rectangle: 0.45,-0.45 0.6,-0.4
  region: 0.45,-0.6 0.45,-0.45 0.4,-0.45 0.4,-0.6
  region: 0.6,-0.6 0.45,-0.6 0.45,-0.65 0.6,-0.65
  rectangle: 0.45,-0.6 0.6,-0.45
Mechanical 13:
  lines w0.1: -0.76,-0.76 -0.76,0.76 0.76,0.76 0.76,-0.76 -0.76,-0.76
Mechanical 15:
  lines w0.1: -0.5,0 0.5,0 ; 0,-0.5 0,0.5 ; -0.86,-0.86 -0.86,0.86 0.86,0.86 0.86,-0.86 -0.86,-0.86
3D body: height 0.68, standoff 0, extent -0.759,-0.759 0.759,0.759

## TLA08JQA [mm] "Micro SMD, 8-Leads, Body 1.87x1.72mm, Pitch 0.5mm, NSC Recommended"
height 0.68
pads (8):
  round 0.265 smd paste-0.132 mask+0.05: A1(-0.5,0.5) A2(0,0.5) A3(0.5,0.5) B1(-0.5,0) B3(0.5,0) C1(-0.5,-0.5) C2(0,-0.5) C3(0.5,-0.5)
Top Overlay:
  circle w0.1: c-0.965,1.04 r0.05
Top Paste:
  circle w0.05: c-0.6,-0.075 r0.025
  circle w0.05: c-0.45,0.075 r0.025
  circle w0.05: c-0.6,0.075 r0.025
  circle w0.05: c-0.45,-0.075 r0.025
  circle w0.05: c-0.075,0.6 r0.025
  circle w0.05: c0.075,0.45 r0.025
  circle w0.05: c0.075,0.6 r0.025
  circle w0.05: c-0.075,0.45 r0.025
  circle w0.05: c0.6,0.075 r0.025
  circle w0.05: c0.45,-0.075 r0.025
  circle w0.05: c0.6,-0.075 r0.025
  circle w0.05: c0.45,0.075 r0.025
  circle w0.05: c0.075,-0.6 r0.025
  circle w0.05: c-0.075,-0.45 r0.025
  circle w0.05: c-0.075,-0.6 r0.025
  circle w0.05: c0.075,-0.45 r0.025
  circle w0.05: c0.45,0.45 r0.025
  circle w0.05: c0.6,0.6 r0.025
  circle w0.05: c0.6,0.45 r0.025
  circle w0.05: c0.45,0.6 r0.025
  circle w0.05: c-0.45,0.45 r0.025
  circle w0.05: c-0.6,0.6 r0.025
  circle w0.05: c-0.45,0.6 r0.025
  circle w0.05: c-0.6,0.45 r0.025
  circle w0.05: c-0.45,-0.45 r0.025
  circle w0.05: c-0.6,-0.6 r0.025
  circle w0.05: c-0.6,-0.45 r0.025
  circle w0.05: c-0.45,-0.6 r0.025
  circle w0.05: c0.45,-0.45 r0.025
  circle w0.05: c0.6,-0.6 r0.025
  circle w0.05: c0.45,-0.6 r0.025
  circle w0.05: c0.6,-0.45 r0.025
  region: -0.45,0.075 -0.45,-0.075 -0.4,-0.075 -0.4,0.075
  rectangle: -0.6,0.075 -0.45,0.125
  region: -0.6,-0.075 -0.6,0.075 -0.65,0.075 -0.65,-0.075
  region: -0.45,-0.075 -0.6,-0.075 -0.6,-0.125 -0.45,-0.125
  rectangle: -0.6,-0.075 -0.45,0.075
  region: 0.075,0.45 -0.075,0.45 -0.075,0.4 0.075,0.4
  region: 0.075,0.6 0.075,0.45 0.125,0.45 0.125,0.6
  rectangle: -0.075,0.6 0.075,0.65
  region: -0.075,0.45 -0.075,0.6 -0.125,0.6 -0.125,0.45
  region: -0.075,0.6 -0.075,0.45 0.075,0.45 0.075,0.6
  region: 0.45,-0.075 0.45,0.075 0.4,0.075 0.4,-0.075
  region: 0.6,-0.075 0.45,-0.075 0.45,-0.125 0.6,-0.125
  region: 0.6,0.075 0.6,-0.075 0.65,-0.075 0.65,0.075
  rectangle: 0.45,0.075 0.6,0.125
  region: 0.6,0.075 0.45,0.075 0.45,-0.075 0.6,-0.075
  rectangle: -0.075,-0.45 0.075,-0.4
  region: -0.075,-0.6 -0.075,-0.45 -0.125,-0.45 -0.125,-0.6
  region: 0.075,-0.6 -0.075,-0.6 -0.075,-0.65 0.075,-0.65
  region: 0.075,-0.45 0.075,-0.6 0.125,-0.6 0.125,-0.45
  region: 0.075,-0.6 0.075,-0.45 -0.075,-0.45 -0.075,-0.6
  region: 0.45,0.6 0.45,0.45 0.6,0.45 0.6,0.6
  region: 0.45,0.45 0.45,0.6 0.4,0.6 0.4,0.45
  rectangle: 0.45,0.6 0.6,0.65
  region: 0.6,0.6 0.6,0.45 0.65,0.45 0.65,0.6
  region: 0.6,0.45 0.45,0.45 0.45,0.4 0.6,0.4
  rectangle: -0.6,0.45 -0.45,0.6
  region: -0.45,0.45 -0.6,0.45 -0.6,0.4 -0.45,0.4
  region: -0.6,0.45 -0.6,0.6 -0.65,0.6 -0.65,0.45
  rectangle: -0.6,0.6 -0.45,0.65
  region: -0.45,0.6 -0.45,0.45 -0.4,0.45 -0.4,0.6
  region: -0.45,-0.6 -0.45,-0.45 -0.6,-0.45 -0.6,-0.6
  region: -0.45,-0.45 -0.45,-0.6 -0.4,-0.6 -0.4,-0.45
  region: -0.45,-0.6 -0.6,-0.6 -0.6,-0.65 -0.45,-0.65
  region: -0.6,-0.6 -0.6,-0.45 -0.65,-0.45 -0.65,-0.6
  rectangle: -0.6,-0.45 -0.45,-0.4
  region: 0.6,-0.45 0.45,-0.45 0.45,-0.6 0.6,-0.6
  rectangle: 0.45,-0.45 0.6,-0.4
  region: 0.6,-0.45 0.6,-0.6 0.65,-0.6 0.65,-0.45
  region: 0.6,-0.6 0.45,-0.6 0.45,-0.65 0.6,-0.65
  region: 0.45,-0.6 0.45,-0.45 0.4,-0.45 0.4,-0.6
Mechanical 13:
  lines w0.1: -0.86,-0.935 0.86,-0.935 0.86,0.935 -0.86,0.935 -0.86,-0.935
Mechanical 15:
  lines w0.1: -0.96,-1.035 0.96,-1.035 0.96,1.035 -0.96,1.035 -0.958,-1.035 ; -0.5,0 0.5,0 ; 0,-0.5 0,0.5
3D body: height 0.68, standoff 0, extent -0.859,-0.934 0.859,0.934

## TLP10BBA [mm] "Micro SMD, 10-Leads, Body 2.02x1.54mm, Pitch 0.5mm, NSC Recommended"
height 0.68
pads (10):
  round 0.265 smd paste-0.132 mask+0.05: A1(-0.5,0.75) A2(0,0.75) A3(0.5,0.75) B1(-0.5,0.25) B3(0.5,0.25) C1(-0.5,-0.25) C3(0.5,-0.25) D1(-0.5,-0.75) D2(0,-0.75) D3(0.5,-0.75)
Top Overlay:
  circle w0.1: c-0.875,1.115 r0.05
Top Paste:
  circle w0.05: c0.6,0.325 r0.025
  circle w0.05: c0.45,0.175 r0.025
  circle w0.05: c0.6,0.175 r0.025
  circle w0.05: c0.45,0.325 r0.025
  circle w0.05: c0.6,-0.175 r0.025
  circle w0.05: c0.45,-0.325 r0.025
  circle w0.05: c0.6,-0.325 r0.025
  circle w0.05: c0.45,-0.175 r0.025
  circle w0.05: c0.075,-0.85 r0.025
  circle w0.05: c-0.075,-0.7 r0.025
  circle w0.05: c-0.075,-0.85 r0.025
  circle w0.05: c0.075,-0.7 r0.025
  circle w0.05: c-0.6,-0.325 r0.025
  circle w0.05: c-0.45,-0.175 r0.025
  circle w0.05: c-0.6,-0.175 r0.025
  circle w0.05: c-0.45,-0.325 r0.025
  circle w0.05: c-0.6,0.175 r0.025
  circle w0.05: c-0.45,0.325 r0.025
  circle w0.05: c-0.6,0.325 r0.025
  circle w0.05: c-0.45,0.175 r0.025
  circle w0.05: c-0.075,0.85 r0.025
  circle w0.05: c0.075,0.7 r0.025
  circle w0.05: c0.075,0.85 r0.025
  circle w0.05: c-0.075,0.7 r0.025
  circle w0.05: c-0.45,-0.7 r0.025
  circle w0.05: c-0.6,-0.85 r0.025
  circle w0.05: c-0.6,-0.7 r0.025
  circle w0.05: c-0.45,-0.85 r0.025
  circle w0.05: c0.45,-0.7 r0.025
  circle w0.05: c0.6,-0.85 r0.025
  circle w0.05: c0.45,-0.85 r0.025
  circle w0.05: c0.6,-0.7 r0.025
  circle w0.05: c0.45,0.7 r0.025
  circle w0.05: c0.6,0.85 r0.025
  circle w0.05: c0.6,0.7 r0.025
  circle w0.05: c0.45,0.85 r0.025
  circle w0.05: c-0.45,0.7 r0.025
  circle w0.05: c-0.6,0.85 r0.025
  circle w0.05: c-0.45,0.85 r0.025
  circle w0.05: c-0.6,0.7 r0.025
  region: 0.45,0.175 0.45,0.325 0.4,0.325 0.4,0.175
  region: 0.6,0.175 0.45,0.175 0.45,0.125 0.6,0.125
  region: 0.6,0.325 0.6,0.175 0.65,0.175 0.65,0.325
  rectangle: 0.45,0.325 0.6,0.375
  region: 0.6,0.325 0.45,0.325 0.45,0.175 0.6,0.175
  region: 0.45,-0.325 0.45,-0.175 0.4,-0.175 0.4,-0.325
  region: 0.6,-0.325 0.45,-0.325 0.45,-0.375 0.6,-0.375
  region: 0.6,-0.175 0.6,-0.325 0.65,-0.325 0.65,-0.175
  rectangle: 0.45,-0.175 0.6,-0.125
  region: 0.6,-0.175 0.45,-0.175 0.45,-0.325 0.6,-0.325
  rectangle: -0.075,-0.7 0.075,-0.65
  region: -0.075,-0.85 -0.075,-0.7 -0.125,-0.7 -0.125,-0.85
  region: 0.075,-0.85 -0.075,-0.85 -0.075,-0.9 0.075,-0.9
  region: 0.075,-0.7 0.075,-0.85 0.125,-0.85 0.125,-0.7
  region: 0.075,-0.85 0.075,-0.7 -0.075,-0.7 -0.075,-0.85
  region: -0.45,-0.175 -0.45,-0.325 -0.4,-0.325 -0.4,-0.175
  rectangle: -0.6,-0.175 -0.45,-0.125
  region: -0.6,-0.325 -0.6,-0.175 -0.65,-0.175 -0.65,-0.325
  region: -0.45,-0.325 -0.6,-0.325 -0.6,-0.375 -0.45,-0.375
  rectangle: -0.6,-0.325 -0.45,-0.175
  region: -0.45,0.325 -0.45,0.175 -0.4,0.175 -0.4,0.325
  rectangle: -0.6,0.325 -0.45,0.375
  region: -0.6,0.175 -0.6,0.325 -0.65,0.325 -0.65,0.175
  region: -0.45,0.175 -0.6,0.175 -0.6,0.125 -0.45,0.125
  rectangle: -0.6,0.175 -0.45,0.325
  region: 0.075,0.7 -0.075,0.7 -0.075,0.65 0.075,0.65
  region: 0.075,0.85 0.075,0.7 0.125,0.7 0.125,0.85
  rectangle: -0.075,0.85 0.075,0.9
  region: -0.075,0.7 -0.075,0.85 -0.125,0.85 -0.125,0.7
  region: -0.075,0.85 -0.075,0.7 0.075,0.7 0.075,0.85
  region: -0.45,-0.85 -0.45,-0.7 -0.6,-0.7 -0.6,-0.85
  region: -0.45,-0.7 -0.45,-0.85 -0.4,-0.85 -0.4,-0.7
  region: -0.45,-0.85 -0.6,-0.85 -0.6,-0.9 -0.45,-0.9
  region: -0.6,-0.85 -0.6,-0.7 -0.65,-0.7 -0.65,-0.85
  rectangle: -0.6,-0.7 -0.45,-0.65
  region: 0.6,-0.7 0.45,-0.7 0.45,-0.85 0.6,-0.85
  rectangle: 0.45,-0.7 0.6,-0.65
  region: 0.6,-0.7 0.6,-0.85 0.65,-0.85 0.65,-0.7
  region: 0.6,-0.85 0.45,-0.85 0.45,-0.9 0.6,-0.9
  region: 0.45,-0.85 0.45,-0.7 0.4,-0.7 0.4,-0.85
  region: 0.45,0.85 0.45,0.7 0.6,0.7 0.6,0.85
  region: 0.45,0.7 0.45,0.85 0.4,0.85 0.4,0.7
  rectangle: 0.45,0.85 0.6,0.9
  region: 0.6,0.85 0.6,0.7 0.65,0.7 0.65,0.85
  region: 0.6,0.7 0.45,0.7 0.45,0.65 0.6,0.65
  rectangle: -0.6,0.7 -0.45,0.85
  region: -0.45,0.7 -0.6,0.7 -0.6,0.65 -0.45,0.65
  region: -0.6,0.7 -0.6,0.85 -0.65,0.85 -0.65,0.7
  rectangle: -0.6,0.85 -0.45,0.9
  region: -0.45,0.85 -0.45,0.7 -0.4,0.7 -0.4,0.85
Mechanical 13:
  lines w0.1: -0.77,-1.01 0.77,-1.01 0.77,1.01 -0.77,1.01 -0.77,-1.01
Mechanical 15:
  lines w0.1: -0.5,0 0.5,0 ; 0,-0.5 0,0.5 ; -0.87,-1.11 0.87,-1.11 0.87,1.11 -0.87,1.11 -0.87,-1.11
3D body: height 0.68, standoff 0, extent -0.769,-1.009 0.769,1.009

## TMD08CCA [mm] "Micro SMD, 8-Leads, Body 1.22x1.22mm, Pitch 0.4mm, NSC Recommended"
height 0.68
pads (8):
  round 0.225 smd paste-0.112 mask+0.05: A1(-0.4,0.4) A2(0,0.4) A3(0.4,0.4) B1(-0.4,0) B3(0.4,0) C1(-0.4,-0.4) C2(0,-0.4) C3(0.4,-0.4)
Top Overlay:
  circle w0.1: c-0.725,0.705 r0.05
Top Paste:
  circle w0.05: c0.35,-0.075 r0.025
  circle w0.05: c0.5,0.075 r0.025
  circle w0.05: c0.35,0.075 r0.025
  circle w0.05: c0.5,-0.075 r0.025
  circle w0.05: c-0.075,-0.35 r0.025
  circle w0.05: c0.075,-0.5 r0.025
  circle w0.05: c0.075,-0.35 r0.025
  circle w0.05: c-0.075,-0.5 r0.025
  circle w0.05: c-0.35,0.075 r0.025
  circle w0.05: c-0.5,-0.075 r0.025
  circle w0.05: c-0.35,-0.075 r0.025
  circle w0.05: c-0.5,0.075 r0.025
  circle w0.05: c0.075,0.35 r0.025
  circle w0.05: c-0.075,0.5 r0.025
  circle w0.05: c-0.075,0.35 r0.025
  circle w0.05: c0.075,0.5 r0.025
  circle w0.05: c-0.35,0.35 r0.025
  circle w0.05: c-0.5,0.5 r0.025
  circle w0.05: c-0.5,0.35 r0.025
  circle w0.05: c-0.35,0.5 r0.025
  circle w0.05: c0.35,0.35 r0.025
  circle w0.05: c0.5,0.5 r0.025
  circle w0.05: c0.5,0.35 r0.025
  circle w0.05: c0.35,0.5 r0.025
  circle w0.05: c0.35,-0.35 r0.025
  circle w0.05: c0.5,-0.5 r0.025
  circle w0.05: c0.5,-0.35 r0.025
  circle w0.05: c0.35,-0.5 r0.025
  circle w0.05: c-0.35,-0.35 r0.025
  circle w0.05: c-0.5,-0.5 r0.025
  circle w0.05: c-0.5,-0.35 r0.025
  circle w0.05: c-0.35,-0.5 r0.025
  region: 0.5,0.075 0.35,0.075 0.35,-0.075 0.5,-0.075
  rectangle: 0.35,-0.125 0.5,-0.075
  region: 0.55,-0.075 0.55,0.075 0.5,0.075 0.5,-0.075
  region: 0.5,0.125 0.35,0.125 0.35,0.075 0.5,0.075
  region: 0.3,0.075 0.3,-0.075 0.35,-0.075 0.35,0.075
  region: 0.075,-0.5 0.075,-0.35 -0.075,-0.35 -0.075,-0.5
  region: -0.125,-0.35 -0.125,-0.5 -0.075,-0.5 -0.075,-0.35
  rectangle: -0.075,-0.55 0.075,-0.5
  region: 0.125,-0.5 0.125,-0.35 0.075,-0.35 0.075,-0.5
  region: 0.075,-0.3 -0.075,-0.3 -0.075,-0.35 0.075,-0.35
  rectangle: -0.5,-0.075 -0.35,0.075
  region: -0.35,0.125 -0.5,0.125 -0.5,0.075 -0.35,0.075
  region: -0.55,0.075 -0.55,-0.075 -0.5,-0.075 -0.5,0.075
  rectangle: -0.5,-0.125 -0.35,-0.075
  region: -0.3,-0.075 -0.3,0.075 -0.35,0.075 -0.35,-0.075
  region: -0.075,0.5 -0.075,0.35 0.075,0.35 0.075,0.5
  region: 0.125,0.35 0.125,0.5 0.075,0.5 0.075,0.35
  region: 0.075,0.55 -0.075,0.55 -0.075,0.5 0.075,0.5
  region: -0.125,0.5 -0.125,0.35 -0.075,0.35 -0.075,0.5
  rectangle: -0.075,0.3 0.075,0.35
  region: -0.5,0.5 -0.5,0.35 -0.35,0.35 -0.35,0.5
  region: -0.3,0.35 -0.3,0.5 -0.35,0.5 -0.35,0.35
  region: -0.35,0.55 -0.5,0.55 -0.5,0.5 -0.35,0.5
  region: -0.55,0.5 -0.55,0.35 -0.5,0.35 -0.5,0.5
  rectangle: -0.5,0.3 -0.35,0.35
  region: 0.35,0.5 0.35,0.35 0.5,0.35 0.5,0.5
  region: 0.35,0.35 0.35,0.5 0.3,0.5 0.3,0.35
  rectangle: 0.35,0.5 0.5,0.55
  region: 0.5,0.5 0.5,0.35 0.55,0.35 0.55,0.5
  region: 0.5,0.35 0.35,0.35 0.35,0.3 0.5,0.3
  region: 0.5,-0.5 0.5,-0.35 0.35,-0.35 0.35,-0.5
  region: 0.3,-0.35 0.3,-0.5 0.35,-0.5 0.35,-0.35
  rectangle: 0.35,-0.55 0.5,-0.5
  region: 0.55,-0.5 0.55,-0.35 0.5,-0.35 0.5,-0.5
  region: 0.5,-0.3 0.35,-0.3 0.35,-0.35 0.5,-0.35
  region: -0.35,-0.5 -0.35,-0.35 -0.5,-0.35 -0.5,-0.5
  region: -0.35,-0.35 -0.35,-0.5 -0.3,-0.5 -0.3,-0.35
  region: -0.35,-0.5 -0.5,-0.5 -0.5,-0.55 -0.35,-0.55
  region: -0.5,-0.5 -0.5,-0.35 -0.55,-0.35 -0.55,-0.5
  rectangle: -0.5,-0.35 -0.35,-0.3
Mechanical 13:
  lines w0.1: -0.61,-0.61 0.61,-0.61 0.61,0.61 -0.61,0.61 -0.61,-0.61
Mechanical 15:
  lines w0.1: -0.5,0 0.5,0 ; 0,-0.5 0,0.5 ; -0.71,-0.71 0.71,-0.71 0.71,0.71 -0.71,0.71 -0.71,-0.71
3D body: height 0.68, standoff 0.17, extent -0.609,-0.609 0.609,0.609

## TPA08AAA [mm] "Micro SMD, 8-Leads, Body 1.29x1.29mm, Pitch 0.5mm, NSC Recommended"
height 0.58
pads (8):
  round 0.165 smd paste-0.082 mask+0.05: A1(-0.5,0.5) A2(0,0.5) A3(0.5,0.5) B1(-0.5,0) B3(0.5,0) C1(-0.5,-0.5) C2(0,-0.5) C3(0.5,-0.5)
Top Overlay:
  circle w0.1: c-0.785,0.785 r0.05
Top Paste:
  circle w0.05: c0.625,0.425 r0.025
  circle w0.05: c0.425,0.625 r0.025
  circle w0.05: c0.425,0.425 r0.025
  circle w0.05: c0.625,0.625 r0.025
  circle w0.05: c-0.425,0.425 r0.025
  circle w0.05: c-0.625,0.625 r0.025
  circle w0.05: c-0.625,0.425 r0.025
  circle w0.05: c-0.425,0.625 r0.025
  circle w0.05: c0.1,0.425 r0.025
  circle w0.05: c-0.1,0.625 r0.025
  circle w0.05: c-0.1,0.425 r0.025
  circle w0.05: c0.1,0.625 r0.025
  circle w0.05: c0.1,-0.425 r0.025
  circle w0.05: c-0.1,-0.625 r0.025
  circle w0.05: c-0.1,-0.425 r0.025
  circle w0.05: c0.1,-0.625 r0.025
  circle w0.05: c-0.425,-0.425 r0.025
  circle w0.05: c-0.625,-0.625 r0.025
  circle w0.05: c-0.625,-0.425 r0.025
  circle w0.05: c-0.425,-0.625 r0.025
  circle w0.05: c0.625,-0.425 r0.025
  circle w0.05: c0.425,-0.625 r0.025
  circle w0.05: c0.425,-0.425 r0.025
  circle w0.05: c0.625,-0.625 r0.025
  circle w0.05: c0.625,-0.1 r0.025
  circle w0.05: c0.425,0.1 r0.025
  circle w0.05: c0.425,-0.1 r0.025
  circle w0.05: c0.625,0.1 r0.025
  circle w0.05: c-0.425,0.1 r0.025
  circle w0.05: c-0.625,-0.1 r0.025
  circle w0.05: c-0.625,0.1 r0.025
  circle w0.05: c-0.425,-0.1 r0.025
  rectangle: 0.425,0.375 0.625,0.425
  region: 0.625,0.675 0.425,0.675 0.425,0.625 0.625,0.625
  region: 0.375,0.625 0.375,0.425 0.425,0.425 0.425,0.625
  region: 0.425,0.625 0.425,0.425 0.625,0.425 0.625,0.625
  region: 0.675,0.425 0.675,0.625 0.625,0.625 0.625,0.425
  rectangle: -0.625,0.375 -0.425,0.425
  region: -0.425,0.675 -0.625,0.675 -0.625,0.625 -0.425,0.625
  region: -0.675,0.625 -0.675,0.425 -0.625,0.425 -0.625,0.625
  region: -0.625,0.625 -0.625,0.425 -0.425,0.425 -0.425,0.625
  region: -0.375,0.425 -0.375,0.625 -0.425,0.625 -0.425,0.425
  rectangle: -0.1,0.375 0.1,0.425
  region: 0.1,0.675 -0.1,0.675 -0.1,0.625 0.1,0.625
  region: -0.15,0.625 -0.15,0.425 -0.1,0.425 -0.1,0.625
  region: -0.1,0.625 -0.1,0.425 0.1,0.425 0.1,0.625
  region: 0.15,0.425 0.15,0.625 0.1,0.625 0.1,0.425
  region: 0.15,-0.625 0.15,-0.425 0.1,-0.425 0.1,-0.625
  region: -0.1,-0.425 -0.1,-0.625 0.1,-0.625 0.1,-0.425
  region: -0.15,-0.425 -0.15,-0.625 -0.1,-0.625 -0.1,-0.425
  region: 0.1,-0.375 -0.1,-0.375 -0.1,-0.425 0.1,-0.425
  rectangle: -0.1,-0.675 0.1,-0.625
  region: -0.375,-0.625 -0.375,-0.425 -0.425,-0.425 -0.425,-0.625
  region: -0.625,-0.425 -0.625,-0.625 -0.425,-0.625 -0.425,-0.425
  region: -0.675,-0.425 -0.675,-0.625 -0.625,-0.625 -0.625,-0.425
  region: -0.425,-0.375 -0.625,-0.375 -0.625,-0.425 -0.425,-0.425
  rectangle: -0.625,-0.675 -0.425,-0.625
  region: 0.675,-0.625 0.675,-0.425 0.625,-0.425 0.625,-0.625
  region: 0.425,-0.425 0.425,-0.625 0.625,-0.625 0.625,-0.425
  region: 0.375,-0.425 0.375,-0.625 0.425,-0.625 0.425,-0.425
  region: 0.625,-0.375 0.425,-0.375 0.425,-0.425 0.625,-0.425
  rectangle: 0.425,-0.675 0.625,-0.625
  rectangle: 0.425,-0.15 0.625,-0.1
  region: 0.625,0.15 0.425,0.15 0.425,0.1 0.625,0.1
  region: 0.375,0.1 0.375,-0.1 0.425,-0.1 0.425,0.1
  region: 0.425,0.1 0.425,-0.1 0.625,-0.1 0.625,0.1
  region: 0.675,-0.1 0.675,0.1 0.625,0.1 0.625,-0.1
  region: -0.375,-0.1 -0.375,0.1 -0.425,0.1 -0.425,-0.1
  region: -0.625,0.1 -0.625,-0.1 -0.425,-0.1 -0.425,0.1
  region: -0.675,0.1 -0.675,-0.1 -0.625,-0.1 -0.625,0.1
  region: -0.425,0.15 -0.625,0.15 -0.625,0.1 -0.425,0.1
  rectangle: -0.625,-0.15 -0.425,-0.1
Mechanical 13:
  lines w0.1: -0.645,-0.645 0.645,-0.645 0.645,0.645 -0.645,0.645 -0.645,-0.645
Mechanical 15:
  lines w0.1: -0.5,0 0.5,0 ; 0,-0.5 0,0.5 ; -0.745,-0.745 0.745,-0.745 0.745,0.745 -0.745,0.745 -0.745,-0.745
3D body: height 0.58, standoff 0, extent -0.644,-0.644 0.644,0.644

## TPA08FFA [mm] "Micro SMD, 8-Leads, Body 1.41x1.41mm, Pitch 0.5mm, NSC Recommended"
height 0.58
pads (8):
  round 0.165 smd paste-0.082 mask+0.05: A1(-0.5,0.5) A2(0,0.5) A3(0.5,0.5) B1(-0.5,0) B3(0.5,0) C1(-0.5,-0.5) C2(0,-0.5) C3(0.5,-0.5)
Top Overlay:
  circle w0.1: c-0.81,0.81 r0.05
Top Paste:
  circle w0.05: c0.425,-0.625 r0.025
  circle w0.05: c0.625,-0.425 r0.025
  circle w0.05: c0.425,-0.425 r0.025
  circle w0.05: c0.625,-0.625 r0.025
  circle w0.05: c-0.1,-0.625 r0.025
  circle w0.05: c0.1,-0.425 r0.025
  circle w0.05: c-0.1,-0.425 r0.025
  circle w0.05: c0.1,-0.625 r0.025
  circle w0.05: c-0.625,-0.625 r0.025
  circle w0.05: c-0.425,-0.425 r0.025
  circle w0.05: c-0.625,-0.425 r0.025
  circle w0.05: c-0.425,-0.625 r0.025
  circle w0.05: c0.425,-0.1 r0.025
  circle w0.05: c0.625,0.1 r0.025
  circle w0.05: c0.425,0.1 r0.025
  circle w0.05: c0.625,-0.1 r0.025
  circle w0.05: c-0.625,-0.1 r0.025
  circle w0.05: c-0.425,0.1 r0.025
  circle w0.05: c-0.625,0.1 r0.025
  circle w0.05: c-0.425,-0.1 r0.025
  circle w0.05: c0.425,0.425 r0.025
  circle w0.05: c0.625,0.625 r0.025
  circle w0.05: c0.425,0.625 r0.025
  circle w0.05: c0.625,0.425 r0.025
  circle w0.05: c-0.1,0.425 r0.025
  circle w0.05: c0.1,0.625 r0.025
  circle w0.05: c-0.1,0.625 r0.025
  circle w0.05: c0.1,0.425 r0.025
  circle w0.05: c-0.625,0.425 r0.025
  circle w0.05: c-0.425,0.625 r0.025
  circle w0.05: c-0.625,0.625 r0.025
  circle w0.05: c-0.425,0.425 r0.025
  region: 0.625,-0.625 0.425,-0.625 0.425,-0.675 0.625,-0.675
  rectangle: 0.425,-0.625 0.625,-0.425
  rectangle: 0.425,-0.425 0.625,-0.375
  region: 0.425,-0.625 0.425,-0.425 0.375,-0.425 0.375,-0.625
  region: 0.625,-0.425 0.625,-0.625 0.675,-0.625 0.675,-0.425
  region: 0.1,-0.625 -0.1,-0.625 -0.1,-0.675 0.1,-0.675
  rectangle: -0.1,-0.625 0.1,-0.425
  rectangle: -0.1,-0.425 0.1,-0.375
  region: -0.1,-0.625 -0.1,-0.425 -0.15,-0.425 -0.15,-0.625
  region: 0.1,-0.425 0.1,-0.625 0.15,-0.625 0.15,-0.425
  region: -0.425,-0.625 -0.625,-0.625 -0.625,-0.675 -0.425,-0.675
  rectangle: -0.625,-0.625 -0.425,-0.425
  rectangle: -0.625,-0.425 -0.425,-0.375
  region: -0.625,-0.625 -0.625,-0.425 -0.675,-0.425 -0.675,-0.625
  region: -0.425,-0.425 -0.425,-0.625 -0.375,-0.625 -0.375,-0.425
  region: 0.625,-0.1 0.425,-0.1 0.425,-0.15 0.625,-0.15
  rectangle: 0.425,-0.1 0.625,0.1
  rectangle: 0.425,0.1 0.625,0.15
  region: 0.425,-0.1 0.425,0.1 0.375,0.1 0.375,-0.1
  region: 0.625,0.1 0.625,-0.1 0.675,-0.1 0.675,0.1
  region: -0.425,-0.1 -0.625,-0.1 -0.625,-0.15 -0.425,-0.15
  rectangle: -0.625,-0.1 -0.425,0.1
  rectangle: -0.625,0.1 -0.425,0.15
  region: -0.625,-0.1 -0.625,0.1 -0.675,0.1 -0.675,-0.1
  region: -0.425,0.1 -0.425,-0.1 -0.375,-0.1 -0.375,0.1
  region: 0.625,0.425 0.425,0.425 0.425,0.375 0.625,0.375
  rectangle: 0.425,0.425 0.625,0.625
  rectangle: 0.425,0.625 0.625,0.675
  region: 0.425,0.425 0.425,0.625 0.375,0.625 0.375,0.425
  region: 0.625,0.625 0.625,0.425 0.675,0.425 0.675,0.625
  region: 0.1,0.425 -0.1,0.425 -0.1,0.375 0.1,0.375
  rectangle: -0.1,0.425 0.1,0.625
  rectangle: -0.1,0.625 0.1,0.675
  region: -0.1,0.425 -0.1,0.625 -0.15,0.625 -0.15,0.425
  region: 0.1,0.625 0.1,0.425 0.15,0.425 0.15,0.625
  region: -0.425,0.425 -0.625,0.425 -0.625,0.375 -0.425,0.375
  rectangle: -0.625,0.425 -0.425,0.625
  rectangle: -0.625,0.625 -0.425,0.675
  region: -0.625,0.425 -0.625,0.625 -0.675,0.625 -0.675,0.425
  region: -0.425,0.625 -0.425,0.425 -0.375,0.425 -0.375,0.625
Mechanical 13:
  lines w0.1: -0.705,-0.705 0.705,-0.705 0.705,0.705 -0.705,0.705 -0.705,-0.705
Mechanical 15:
  lines w0.1: -0.5,0 0.5,0 ; 0,-0.5 0,0.5 ; -0.805,-0.805 0.805,-0.805 0.805,0.805 -0.805,0.805 -0.805,-0.805
3D body: height 0.58, standoff 0, extent -0.705,-0.705 0.705,0.705

## TS7B_L [mm] "D2-PAK, 8-Leads, Body 8.6x10.2mm, Pitch 1.27mm, Lead Span 14.1mm, IPC High Density"
height 4.64
pads (8):
  rect 2.9x0.9 smd: 1(-5.95,3.81) 2(-5.95,2.54) 3(-5.95,1.27) 4(-5.95,0) 5(-5.95,-1.27) 6(-5.95,-2.54) 7(-5.95,-3.81)
  rect 8x10.45 smd: 8(3.4,0)
Top Overlay:
  circle w0.25: c-5.95,4.81 r0.125
  lines w0.2: -1,-5.2 -3.4,-5.2 -3.4,5.2 -1,5.2
Mechanical 13:
  lines w0.1: -3.4,-5.2 6,-5.2 6,5.2 -3.4,5.2 -3.4,-5.2
Mechanical 15:
  lines w0.1: -0.5,0 0.5,0 ; 0,-0.5 0,0.5 ; -7.5,-5.35 7.5,-5.35 7.5,5.35 -7.5,5.35 -7.5,-5.35
3D body: height 4.64, standoff 0, extent -3.4,-5.2 6,5.2